# Altium footprint library 2.10-LQFP封装.PcbLib: 97 footprints (part 4 of 7)
Each footprint in its own frame and in the unit in brackets; x right, y up, seen from the top. Pads: shape width x height; smd on the part's side, far side on the other; paste and mask are expansions set on the pad; w line width, h text height; cw(c..) or ccw(c..) is an arc to the next point about the centre after c.
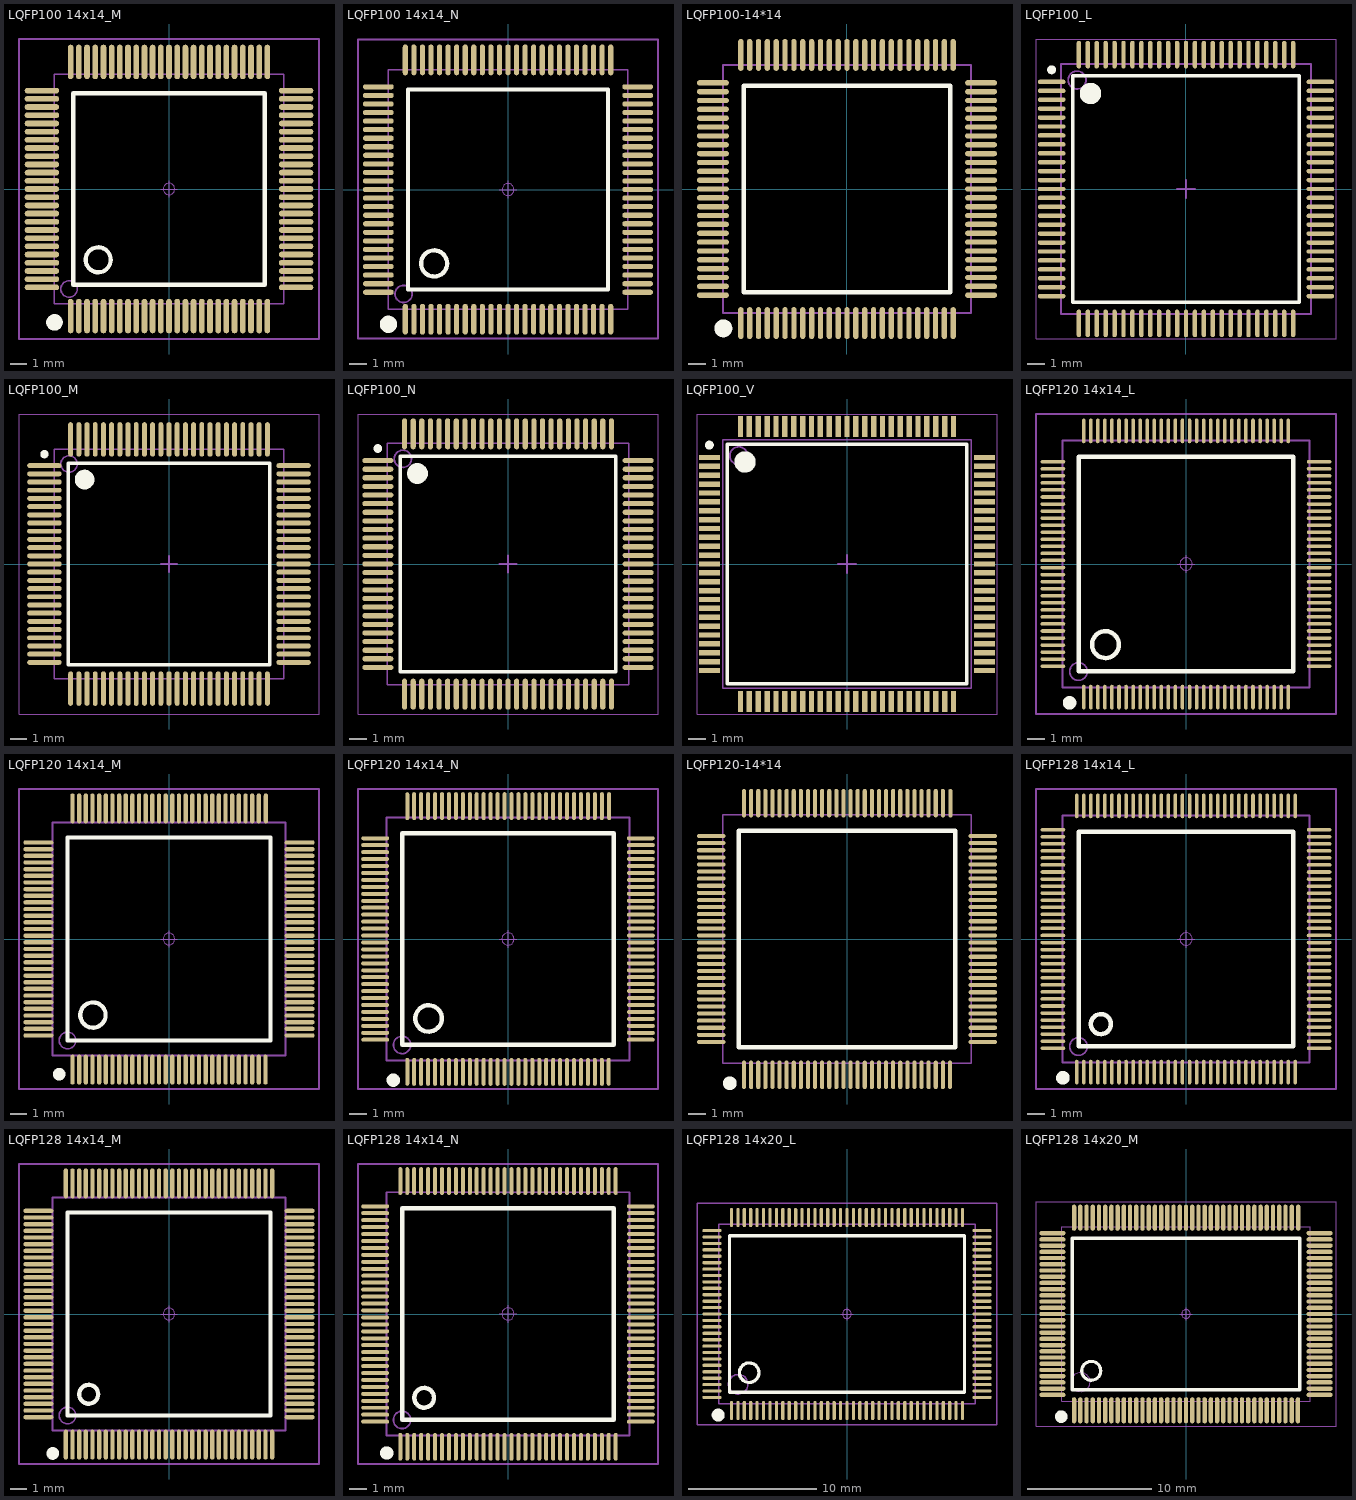
[diagram p3: the footprints below, top view; thin cyan lines are the x and y axes]

## LQFP100 14x14_M [mm] "100脚，体宽14x14mm，脚距0.5mm"
height 1.6
pads (100):
  oval 0.35x2.1 smd: 1(-6,-7.747) 2(-5.5,-7.747) 3(-5,-7.747) 4(-4.5,-7.747) 5(-4,-7.747) 6(-3.5,-7.747) 7(-3,-7.747) 8(-2.5,-7.747) 9(-2,-7.747) 10(-1.5,-7.747) 11(-1,-7.747) 12(-0.5,-7.747) 13(0,-7.747) 14(0.5,-7.747) 15(1,-7.747) 16(1.5,-7.747) 17(2,-7.747) 18(2.5,-7.747) 19(3,-7.747) 20(3.5,-7.747) 21(4,-7.747) 22(4.5,-7.747) 23(5,-7.747) 24(5.5,-7.747) 25(6,-7.747) 51(6,7.758) 52(5.5,7.758) 53(5,7.758) 54(4.5,7.758) 55(4,7.758) 56(3.5,7.758) 57(3,7.758) 58(2.5,7.758) 59(2,7.758) 60(1.5,7.758) 61(1,7.758) 62(0.5,7.758) 63(0,7.758) 64(-0.5,7.758) 65(-1,7.758) 66(-1.5,7.758) 67(-2,7.758) 68(-2.5,7.758) 69(-3,7.758) 70(-3.5,7.758) 71(-4,7.758) 72(-4.5,7.758) 73(-5,7.758) 74(-5.5,7.758) 75(-6,7.758)
  oval 2.1x0.35 smd: 26(7.752,-5.994) 27(7.752,-5.494) 28(7.752,-4.994) 29(7.752,-4.494) 30(7.752,-3.994) 31(7.752,-3.494) 32(7.752,-2.994) 33(7.752,-2.494) 34(7.752,-1.994) 35(7.752,-1.494) 36(7.752,-0.994) 37(7.752,-0.494) 38(7.752,0.006) 39(7.752,0.506) 40(7.752,1.006) 41(7.752,1.506) 42(7.752,2.006) 43(7.752,2.506) 44(7.752,3.006) 45(7.752,3.506) 46(7.752,4.006) 47(7.752,4.506) 48(7.752,5.006) 49(7.752,5.506) 50(7.752,6.006) 76(-7.752,6.006) 77(-7.752,5.506) 78(-7.752,5.006) 79(-7.752,4.506) 80(-7.752,4.006) 81(-7.752,3.506) 82(-7.752,3.006) 83(-7.752,2.506) 84(-7.752,2.006) 85(-7.752,1.506) 86(-7.752,1.006) 87(-7.752,0.506) 88(-7.752,0.006) 89(-7.752,-0.494) 90(-7.752,-0.994) 91(-7.752,-1.494) 92(-7.752,-1.994) 93(-7.752,-2.494) 94(-7.752,-2.994) 95(-7.752,-3.494) 96(-7.752,-3.994) 97(-7.752,-4.494) 98(-7.752,-4.994) 99(-7.752,-5.494) 100(-7.752,-5.994)
Top Overlay:
  circle w0.508: c-6.985,-8.128 r0.25
  circle w0.254: c-4.318,-4.312 r0.762
  lines w0.254: -5.842,-5.836 -5.842,5.848 5.842,5.848 5.842,-5.836 -5.842,-5.836
Mechanical 13:
  circle w0.1: c-6.1,-6.094 r0.5
  lines w0.1: -7,-6.994 7,-6.994 7,7.006 -7,7.006 -7,-6.994
Mechanical 15:
  circle w0.05: c0,0.006 r0.35
  lines w0.05: -0.5,0.006 0.5,0.006 ; 0,-0.494 0,0.506
  lines w0.1: -9.15,-9.144 9.15,-9.144 9.15,9.156 -9.15,9.156 -9.15,-9.144
3D body "LQFP100-14x14.STEP": height 1.45, standoff -0.01, extent -8.003,-7.997 8.003,8.009

## LQFP100 14x14_N [mm] "100脚，体宽14x14mm，脚距0.5mm"
height 1.6
pads (100):
  oval 0.3x1.8 smd: 1(-6,-7.575) 2(-5.5,-7.575) 3(-5,-7.575) 4(-4.5,-7.575) 5(-4,-7.575) 6(-3.5,-7.575) 7(-3,-7.575) 8(-2.5,-7.575) 9(-2,-7.575) 10(-1.5,-7.575) 11(-1,-7.575) 12(-0.5,-7.575) 13(0,-7.575) 14(0.5,-7.575) 15(1,-7.575) 16(1.5,-7.575) 17(2,-7.575) 18(2.5,-7.575) 19(3,-7.575) 20(3.5,-7.575) 21(4,-7.575) 22(4.5,-7.575) 23(5,-7.575) 24(5.5,-7.575) 25(6,-7.575) 51(6,7.575) 52(5.5,7.575) 53(5,7.575) 54(4.5,7.575) 55(4,7.575) 56(3.5,7.575) 57(3,7.575) 58(2.5,7.575) 59(2,7.575) 60(1.5,7.575) 61(1,7.575) 62(0.5,7.575) 63(0,7.575) 64(-0.5,7.575) 65(-1,7.575) 66(-1.5,7.575) 67(-2,7.575) 68(-2.5,7.575) 69(-3,7.575) 70(-3.5,7.575) 71(-4,7.575) 72(-4.5,7.575) 73(-5,7.575) 74(-5.5,7.575) 75(-6,7.575)
  oval 1.8x0.3 smd: 26(7.576,-6) 27(7.576,-5.5) 28(7.576,-5) 29(7.576,-4.5) 30(7.576,-4) 31(7.576,-3.5) 32(7.576,-3) 33(7.576,-2.5) 34(7.576,-2) 35(7.576,-1.5) 36(7.576,-1) 37(7.576,-0.5) 38(7.576,0) 39(7.576,0.5) 40(7.576,1) 41(7.576,1.5) 42(7.576,2) 43(7.576,2.5) 44(7.576,3) 45(7.576,3.5) 46(7.576,4) 47(7.576,4.5) 48(7.576,5) 49(7.576,5.5) 50(7.576,6) 76(-7.575,6) 77(-7.575,5.5) 78(-7.575,5) 79(-7.575,4.5) 80(-7.575,4) 81(-7.575,3.5) 82(-7.575,3) 83(-7.575,2.5) 84(-7.575,2) 85(-7.575,1.5) 86(-7.575,1) 87(-7.575,0.5) 88(-7.575,0) 89(-7.575,-0.5) 90(-7.575,-1) 91(-7.575,-1.5) 92(-7.575,-2) 93(-7.575,-2.5) 94(-7.575,-3) 95(-7.575,-3.5) 96(-7.575,-4) 97(-7.575,-4.5) 98(-7.575,-5) 99(-7.575,-5.5) 100(-7.575,-6)
Top Overlay:
  circle w0.508: c-6.985,-7.874 r0.25
  circle w0.254: c-4.318,-4.318 r0.762
  lines w0.254: -5.842,-5.842 -5.842,5.842 5.842,5.842 5.842,-5.842 -5.842,-5.842
Mechanical 13:
  circle w0.1: c-6.1,-6.1 r0.5
  lines w0.1: -7,-7 7,-7 7,7 -7,7 -7,-7
Mechanical 15:
  circle w0.05: c0,0 r0.35
  lines w0.05: -0.5,0 0.5,0 ; 0,-0.5 0,0.5
  lines w0.1: -8.763,-8.7 8.763,-8.7 8.763,8.763 -8.763,8.763 -8.763,-8.7
3D body "LQFP100-14x14.STEP": height 1.45, standoff -0.01, extent -8.003,-8.003 8.003,8.003

## LQFP100-14*14 [mm] "14x14mm，0.5mm       淘宝ID:黄晶宝石"
height 1.6
pads (100):
  oval 0.3x1.8 smd: 1(-6,-7.575) 2(-5.5,-7.575) 3(-5,-7.575) 4(-4.5,-7.575) 5(-4,-7.575) 6(-3.5,-7.575) 7(-3,-7.575) 8(-2.5,-7.575) 9(-2,-7.575) 10(-1.5,-7.575) 11(-1,-7.575) 12(-0.5,-7.575) 13(0,-7.575) 14(0.5,-7.575) 15(1,-7.575) 16(1.5,-7.575) 17(2,-7.575) 18(2.5,-7.575) 19(3,-7.575) 20(3.5,-7.575) 21(4,-7.575) 22(4.5,-7.575) 23(5,-7.575) 24(5.5,-7.575) 25(6,-7.575) 51(6,7.575) 52(5.5,7.575) 53(5,7.575) 54(4.5,7.575) 55(4,7.575) 56(3.5,7.575) 57(3,7.575) 58(2.5,7.575) 59(2,7.575) 60(1.5,7.575) 61(1,7.575) 62(0.5,7.575) 63(0,7.575) 64(-0.5,7.575) 65(-1,7.575) 66(-1.5,7.575) 67(-2,7.575) 68(-2.5,7.575) 69(-3,7.575) 70(-3.5,7.575) 71(-4,7.575) 72(-4.5,7.575) 73(-5,7.575) 74(-5.5,7.575) 75(-6,7.575)
  oval 1.8x0.3 smd: 26(7.576,-6) 27(7.576,-5.5) 28(7.576,-5) 29(7.576,-4.5) 30(7.576,-4) 31(7.576,-3.5) 32(7.576,-3) 33(7.576,-2.5) 34(7.576,-2) 35(7.576,-1.5) 36(7.576,-1) 37(7.576,-0.5) 38(7.576,0) 39(7.576,0.5) 40(7.576,1) 41(7.576,1.5) 42(7.576,2) 43(7.576,2.5) 44(7.576,3) 45(7.576,3.5) 46(7.576,4) 47(7.576,4.5) 48(7.576,5) 49(7.576,5.5) 50(7.576,6) 76(-7.575,6) 77(-7.575,5.5) 78(-7.575,5) 79(-7.575,4.5) 80(-7.575,4) 81(-7.575,3.5) 82(-7.575,3) 83(-7.575,2.5) 84(-7.575,2) 85(-7.575,1.5) 86(-7.575,1) 87(-7.575,0.5) 88(-7.575,0) 89(-7.575,-0.5) 90(-7.575,-1) 91(-7.575,-1.5) 92(-7.575,-2) 93(-7.575,-2.5) 94(-7.575,-3) 95(-7.575,-3.5) 96(-7.575,-4) 97(-7.575,-4.5) 98(-7.575,-5) 99(-7.575,-5.5) 100(-7.575,-6)
Top Overlay:
  circle w0.508: c-6.985,-7.874 r0.25
  lines w0.254: -5.842,-5.842 5.842,-5.842 5.842,5.842 -5.842,5.842 -5.842,-5.842
Mechanical 13:
  lines w0.1: -7,-7 -7,7 7,7 7,-7 -7,-7
3D body "LQFP100-14x14.STEP": height 1.45, standoff 0, extent -8.003,-8.003 8.003,8.003

## LQFP100_L [mm] "封装库来自淘宝 ID：黄晶宝石 Thin QFP, 100-Leads, Body 14x14mm, Pitch 0.5mm, IPC High Density"
height 1.6
pads (100):
  oval 1.55x0.25 smd: 1(-7.525,6) 2(-7.525,5.5) 3(-7.525,5) 4(-7.525,4.5) 5(-7.525,4) 6(-7.525,3.5) 7(-7.525,3) 8(-7.525,2.5) 9(-7.525,2) 10(-7.525,1.5) 11(-7.525,1) 12(-7.525,0.5) 13(-7.525,0) 14(-7.525,-0.5) 15(-7.525,-1) 16(-7.525,-1.5) 17(-7.525,-2) 18(-7.525,-2.5) 19(-7.525,-3) 20(-7.525,-3.5) 21(-7.525,-4) 22(-7.525,-4.5) 23(-7.525,-5) 24(-7.525,-5.5) 25(-7.525,-6) 51(7.525,-6) 52(7.525,-5.5) 53(7.525,-5) 54(7.525,-4.5) 55(7.525,-4) 56(7.525,-3.5) 57(7.525,-3) 58(7.525,-2.5) 59(7.525,-2) 60(7.525,-1.5) 61(7.525,-1) 62(7.525,-0.5) 63(7.525,0) 64(7.525,0.5) 65(7.525,1) 66(7.525,1.5) 67(7.525,2) 68(7.525,2.5) 69(7.525,3) 70(7.525,3.5) 71(7.525,4) 72(7.525,4.5) 73(7.525,5) 74(7.525,5.5) 75(7.525,6)
  oval 0.25x1.55 smd: 26(-6,-7.525) 27(-5.5,-7.525) 28(-5,-7.525) 29(-4.5,-7.525) 30(-4,-7.525) 31(-3.5,-7.525) 32(-3,-7.525) 33(-2.5,-7.525) 34(-2,-7.525) 35(-1.5,-7.525) 36(-1,-7.525) 37(-0.5,-7.525) 38(0,-7.525) 39(0.5,-7.525) 40(1,-7.525) 41(1.5,-7.525) 42(2,-7.525) 43(2.5,-7.525) 44(3,-7.525) 45(3.5,-7.525) 46(4,-7.525) 47(4.5,-7.525) 48(5,-7.525) 49(5.5,-7.525) 50(6,-7.525) 76(6,7.525) 77(5.5,7.525) 78(5,7.525) 79(4.5,7.525) 80(4,7.525) 81(3.5,7.525) 82(3,7.525) 83(2.5,7.525) 84(2,7.525) 85(1.5,7.525) 86(1,7.525) 87(0.5,7.525) 88(0,7.525) 89(-0.5,7.525) 90(-1,7.525) 91(-1.5,7.525) 92(-2,7.525) 93(-2.5,7.525) 94(-3,7.525) 95(-3.5,7.525) 96(-4,7.525) 97(-4.5,7.525) 98(-5,7.525) 99(-5.5,7.525) 100(-6,7.525)
Top Overlay:
  circle w0.6: c-5.35,5.35 r0.3
  circle w0.25: c-7.525,6.675 r0.125
  lines w0.2: -6.35,-6.35 6.35,-6.35 6.35,6.35 -6.35,6.35 -6.35,-6.35
Mechanical 13:
  circle w0.1: c-6.1,6.1 r0.5
  lines w0.1: -7,-7 7,-7 7,7 -7,7 -7,-7
Mechanical 15:
  lines w0.05: -8.4,-8.4 8.4,-8.4 8.4,8.4 -8.4,8.4 -8.4,-8.4
  lines w0.1: -0.5,0 0.5,0 ; 0,-0.5 0,0.5
3D body "LQFP100-14x14.STEP": height 1.45, standoff -0.01, extent -8.003,-8.003 8.003,8.003

## LQFP100_M [mm] "封装库来自淘宝 ID：黄晶宝石 Thin QFP, 100-Leads, Body 14x14mm, Pitch 0.5mm, IPC Low Density"
height 1.6
pads (100):
  oval 2.1x0.3 smd: 1(-7.6,6) 2(-7.6,5.5) 3(-7.6,5) 4(-7.6,4.5) 5(-7.6,4) 6(-7.6,3.5) 7(-7.6,3) 8(-7.6,2.5) 9(-7.6,2) 10(-7.6,1.5) 11(-7.6,1) 12(-7.6,0.5) 13(-7.6,0) 14(-7.6,-0.5) 15(-7.6,-1) 16(-7.6,-1.5) 17(-7.6,-2) 18(-7.6,-2.5) 19(-7.6,-3) 20(-7.6,-3.5) 21(-7.6,-4) 22(-7.6,-4.5) 23(-7.6,-5) 24(-7.6,-5.5) 25(-7.6,-6) 51(7.6,-6) 52(7.6,-5.5) 53(7.6,-5) 54(7.6,-4.5) 55(7.6,-4) 56(7.6,-3.5) 57(7.6,-3) 58(7.6,-2.5) 59(7.6,-2) 60(7.6,-1.5) 61(7.6,-1) 62(7.6,-0.5) 63(7.6,0) 64(7.6,0.5) 65(7.6,1) 66(7.6,1.5) 67(7.6,2) 68(7.6,2.5) 69(7.6,3) 70(7.6,3.5) 71(7.6,4) 72(7.6,4.5) 73(7.6,5) 74(7.6,5.5) 75(7.6,6)
  oval 0.3x2.1 smd: 26(-6,-7.6) 27(-5.5,-7.6) 28(-5,-7.6) 29(-4.5,-7.6) 30(-4,-7.6) 31(-3.5,-7.6) 32(-3,-7.6) 33(-2.5,-7.6) 34(-2,-7.6) 35(-1.5,-7.6) 36(-1,-7.6) 37(-0.5,-7.6) 38(0,-7.6) 39(0.5,-7.6) 40(1,-7.6) 41(1.5,-7.6) 42(2,-7.6) 43(2.5,-7.6) 44(3,-7.6) 45(3.5,-7.6) 46(4,-7.6) 47(4.5,-7.6) 48(5,-7.6) 49(5.5,-7.6) 50(6,-7.6) 76(6,7.6) 77(5.5,7.6) 78(5,7.6) 79(4.5,7.6) 80(4,7.6) 81(3.5,7.6) 82(3,7.6) 83(2.5,7.6) 84(2,7.6) 85(1.5,7.6) 86(1,7.6) 87(0.5,7.6) 88(0,7.6) 89(-0.5,7.6) 90(-1,7.6) 91(-1.5,7.6) 92(-2,7.6) 93(-2.5,7.6) 94(-3,7.6) 95(-3.5,7.6) 96(-4,7.6) 97(-4.5,7.6) 98(-5,7.6) 99(-5.5,7.6) 100(-6,7.6)
Top Overlay:
  circle w0.25: c-7.6,6.7 r0.125
  circle w0.6: c-5.15,5.15 r0.3
  lines w0.2: -6.15,-6.15 -6.15,6.15 6.15,6.15 6.15,-6.15 -6.15,-6.15
Mechanical 13:
  circle w0.1: c-6.1,6.1 r0.5
  lines w0.1: -7,-7 -7,7 7,7 7,-7 -7,-7
Mechanical 15:
  lines w0.05: -9.15,-9.15 -9.15,9.15 9.15,9.15 9.15,-9.15 -9.15,-9.15
  lines w0.1: -0.5,0 0.5,0 ; 0,-0.5 0,0.5
3D body "LQFP100-14x14.STEP": height 1.45, standoff -0.01, extent -8.003,-8.003 8.003,8.003

## LQFP100_N [mm] "封装库来自淘宝 ID：黄晶宝石 Thin QFP, 100-Leads, Body 14x14mm, Pitch 0.5mm, IPC Medium Density"
height 1.6
pads (100):
  oval 1.8x0.3 smd: 1(-7.55,6) 2(-7.55,5.5) 3(-7.55,5) 4(-7.55,4.5) 5(-7.55,4) 6(-7.55,3.5) 7(-7.55,3) 8(-7.55,2.5) 9(-7.55,2) 10(-7.55,1.5) 11(-7.55,1) 12(-7.55,0.5) 13(-7.55,0) 14(-7.55,-0.5) 15(-7.55,-1) 16(-7.55,-1.5) 17(-7.55,-2) 18(-7.55,-2.5) 19(-7.55,-3) 20(-7.55,-3.5) 21(-7.55,-4) 22(-7.55,-4.5) 23(-7.55,-5) 24(-7.55,-5.5) 25(-7.55,-6) 51(7.55,-6) 52(7.55,-5.5) 53(7.55,-5) 54(7.55,-4.5) 55(7.55,-4) 56(7.55,-3.5) 57(7.55,-3) 58(7.55,-2.5) 59(7.55,-2) 60(7.55,-1.5) 61(7.55,-1) 62(7.55,-0.5) 63(7.55,0) 64(7.55,0.5) 65(7.55,1) 66(7.55,1.5) 67(7.55,2) 68(7.55,2.5) 69(7.55,3) 70(7.55,3.5) 71(7.55,4) 72(7.55,4.5) 73(7.55,5) 74(7.55,5.5) 75(7.55,6)
  oval 0.3x1.8 smd: 26(-6,-7.55) 27(-5.5,-7.55) 28(-5,-7.55) 29(-4.5,-7.55) 30(-4,-7.55) 31(-3.5,-7.55) 32(-3,-7.55) 33(-2.5,-7.55) 34(-2,-7.55) 35(-1.5,-7.55) 36(-1,-7.55) 37(-0.5,-7.55) 38(0,-7.55) 39(0.5,-7.55) 40(1,-7.55) 41(1.5,-7.55) 42(2,-7.55) 43(2.5,-7.55) 44(3,-7.55) 45(3.5,-7.55) 46(4,-7.55) 47(4.5,-7.55) 48(5,-7.55) 49(5.5,-7.55) 50(6,-7.55) 76(6,7.55) 77(5.5,7.55) 78(5,7.55) 79(4.5,7.55) 80(4,7.55) 81(3.5,7.55) 82(3,7.55) 83(2.5,7.55) 84(2,7.55) 85(1.5,7.55) 86(1,7.55) 87(0.5,7.55) 88(0,7.55) 89(-0.5,7.55) 90(-1,7.55) 91(-1.5,7.55) 92(-2,7.55) 93(-2.5,7.55) 94(-3,7.55) 95(-3.5,7.55) 96(-4,7.55) 97(-4.5,7.55) 98(-5,7.55) 99(-5.5,7.55) 100(-6,7.55)
Top Overlay:
  circle w0.25: c-7.55,6.7 r0.125
  circle w0.6: c-5.25,5.25 r0.3
  lines w0.2: -6.25,-6.25 -6.25,6.25 6.25,6.25 6.25,-6.25 -6.25,-6.25
Mechanical 13:
  circle w0.1: c-6.1,6.1 r0.5
  lines w0.1: -7,-7 -7,7 7,7 7,-7 -7,-7
Mechanical 15:
  lines w0.05: -8.7,-8.7 -8.7,8.7 8.7,8.7 8.7,-8.7 -8.7,-8.7
  lines w0.1: -0.5,0 0.5,0 ; 0,-0.5 0,0.5
3D body "LQFP100-14x14.STEP": height 1.45, standoff -0.01, extent -8.003,-8.003 8.003,8.003

## LQFP100_V [mm] "Thin QFP, 100-Leads, Body 14x14mm, Pitch 0.5mm, ST Recommended"
height 1.6
pads (100):
  rect 1.2x0.3 smd: 1(-7.75,6) 2(-7.75,5.5) 3(-7.75,5) 4(-7.75,4.5) 5(-7.75,4) 6(-7.75,3.5) 7(-7.75,3) 8(-7.75,2.5) 9(-7.75,2) 10(-7.75,1.5) 11(-7.75,1) 12(-7.75,0.5) 13(-7.75,0) 14(-7.75,-0.5) 15(-7.75,-1) 16(-7.75,-1.5) 17(-7.75,-2) 18(-7.75,-2.5) 19(-7.75,-3) 20(-7.75,-3.5) 21(-7.75,-4) 22(-7.75,-4.5) 23(-7.75,-5) 24(-7.75,-5.5) 25(-7.75,-6) 51(7.75,-6) 52(7.75,-5.5) 53(7.75,-5) 54(7.75,-4.5) 55(7.75,-4) 56(7.75,-3.5) 57(7.75,-3) 58(7.75,-2.5) 59(7.75,-2) 60(7.75,-1.5) 61(7.75,-1) 62(7.75,-0.5) 63(7.75,0) 64(7.75,0.5) 65(7.75,1) 66(7.75,1.5) 67(7.75,2) 68(7.75,2.5) 69(7.75,3) 70(7.75,3.5) 71(7.75,4) 72(7.75,4.5) 73(7.75,5) 74(7.75,5.5) 75(7.75,6)
  rect 0.3x1.2 smd: 26(-6,-7.75) 27(-5.5,-7.75) 28(-5,-7.75) 29(-4.5,-7.75) 30(-4,-7.75) 31(-3.5,-7.75) 32(-3,-7.75) 33(-2.5,-7.75) 34(-2,-7.75) 35(-1.5,-7.75) 36(-1,-7.75) 37(-0.5,-7.75) 38(0,-7.75) 39(0.5,-7.75) 40(1,-7.75) 41(1.5,-7.75) 42(2,-7.75) 43(2.5,-7.75) 44(3,-7.75) 45(3.5,-7.75) 46(4,-7.75) 47(4.5,-7.75) 48(5,-7.75) 49(5.5,-7.75) 50(6,-7.75) 76(6,7.75) 77(5.5,7.75) 78(5,7.75) 79(4.5,7.75) 80(4,7.75) 81(3.5,7.75) 82(3,7.75) 83(2.5,7.75) 84(2,7.75) 85(1.5,7.75) 86(1,7.75) 87(0.5,7.75) 88(0,7.75) 89(-0.5,7.75) 90(-1,7.75) 91(-1.5,7.75) 92(-2,7.75) 93(-2.5,7.75) 94(-3,7.75) 95(-3.5,7.75) 96(-4,7.75) 97(-4.5,7.75) 98(-5,7.75) 99(-5.5,7.75) 100(-6,7.75)
Top Overlay:
  circle w0.6: c-5.75,5.75 r0.3
  circle w0.25: c-7.75,6.7 r0.125
  lines w0.2: -6.75,-6.75 6.75,-6.75 6.75,6.75 -6.75,6.75 -6.75,-6.75
Mechanical 13:
  circle w0.1: c-6.1,6.1 r0.5
  lines w0.1: -7,-7 7,-7 7,7 -7,7 -7,-7
Mechanical 15:
  lines w0.05: -8.45,-8.45 8.45,-8.45 8.45,8.45 -8.45,8.45 -8.45,-8.45
  lines w0.1: -0.5,0 0.5,0 ; 0,-0.5 0,0.5
3D body: height 1.6, standoff 0.05, extent -7,-7 7,7

## LQFP120 14x14_L [mm] "120脚，体宽：14x14mm, 脚距：0.4mm"
pads (120):
  oval 0.2x1.4 smd: 1(-5.8,-7.549) 2(-5.4,-7.549) 3(-5,-7.549) 4(-4.6,-7.549) 5(-4.2,-7.549) 6(-3.8,-7.549) 7(-3.4,-7.549) 8(-3,-7.549) 9(-2.6,-7.549) 10(-2.2,-7.549) 11(-1.8,-7.549) 12(-1.4,-7.549) 13(-1,-7.549) 14(-0.6,-7.549) 15(-0.2,-7.549) 16(0.2,-7.549) 17(0.6,-7.549) 18(1,-7.549) 19(1.4,-7.549) 20(1.8,-7.549) 21(2.2,-7.549) 22(2.6,-7.549) 23(3,-7.549) 24(3.4,-7.549) 25(3.8,-7.549) 26(4.2,-7.549) 27(4.6,-7.549) 28(5,-7.549) 29(5.4,-7.549) 30(5.8,-7.549) 61(5.8,7.549) 62(5.4,7.549) 63(5,7.549) 64(4.6,7.549) 65(4.2,7.549) 66(3.8,7.549) 67(3.4,7.549) 68(3,7.549) 69(2.6,7.549) 70(2.2,7.549) 71(1.8,7.549) 72(1.4,7.549) 73(1,7.549) 74(0.6,7.549) 75(0.2,7.549) 76(-0.2,7.549) 77(-0.6,7.549) 78(-1,7.549) 79(-1.4,7.549) 80(-1.8,7.549) 81(-2.2,7.549) 82(-2.6,7.549) 83(-3,7.549) 84(-3.4,7.549) 85(-3.8,7.549) 86(-4.2,7.549) 87(-4.6,7.549) 88(-5,7.549) 89(-5.4,7.549) 90(-5.8,7.549)
  oval 1.4x0.2 smd: 31(7.549,-5.8) 32(7.549,-5.4) 33(7.549,-5) 34(7.549,-4.6) 35(7.549,-4.2) 36(7.549,-3.8) 37(7.549,-3.4) 38(7.549,-3) 39(7.549,-2.6) 40(7.549,-2.2) 41(7.549,-1.8) 42(7.549,-1.4) 43(7.549,-1) 44(7.549,-0.6) 45(7.549,-0.2) 46(7.549,0.2) 47(7.549,0.6) 48(7.549,1) 49(7.549,1.4) 50(7.549,1.8) 51(7.549,2.2) 52(7.549,2.6) 53(7.549,3) 54(7.549,3.4) 55(7.549,3.8) 56(7.549,4.2) 57(7.549,4.6) 58(7.549,5) 59(7.549,5.4) 60(7.549,5.8) 91(-7.549,5.8) 92(-7.549,5.4) 93(-7.549,5) 94(-7.549,4.6) 95(-7.549,4.2) 96(-7.549,3.8) 97(-7.549,3.4) 98(-7.549,3) 99(-7.549,2.6) 100(-7.549,2.2) 101(-7.549,1.8) 102(-7.549,1.4) 103(-7.549,1) 104(-7.549,0.6) 105(-7.549,0.2) 106(-7.549,-0.2) 107(-7.549,-0.6) 108(-7.549,-1) 109(-7.549,-1.4) 110(-7.549,-1.8) 111(-7.549,-2.2) 112(-7.549,-2.6) 113(-7.549,-3) 114(-7.549,-3.4) 115(-7.549,-3.8) 116(-7.549,-4.2) 117(-7.549,-4.6) 118(-7.549,-5) 119(-7.549,-5.4) 120(-7.549,-5.8)
Top Overlay:
  circle w0.254: c-4.572,-4.572 r0.762
  circle w0.508: c-6.604,-7.874 r0.127
  lines w0.254: -6.096,-6.096 -6.096,6.096 6.096,6.096 6.096,-6.096 -6.096,-6.096
Mechanical 13:
  circle w0.1: c-6.1,-6.1 r0.5
  lines w0.1: -7,-7 -7,7 7,7 7,-7 -7,-7
Mechanical 15:
  circle w0.05: c0,0 r0.35
  lines w0.05: -0.5,0 0.5,0 ; 0,-0.5 0,0.5
  lines w0.1: -8.509,-8.509 -8.509,8.509 8.509,8.509 8.509,-8.509 -8.509,-8.509
3D body "LQFP120-14x14.STEP": height 1.45, standoff -0.01, extent -8.003,-8.003 8.003,8.003

## LQFP120 14x14_M [mm] "120脚，体宽：14x14mm, 脚距：0.4mm       淘宝ID:黄晶宝石"
pads (120):
  oval 0.26x1.8 smd: 1(-5.8,-7.854) 2(-5.4,-7.854) 3(-5,-7.854) 4(-4.6,-7.854) 5(-4.2,-7.854) 6(-3.8,-7.854) 7(-3.4,-7.854) 8(-3,-7.854) 9(-2.6,-7.854) 10(-2.2,-7.854) 11(-1.8,-7.854) 12(-1.4,-7.854) 13(-1,-7.854) 14(-0.6,-7.854) 15(-0.2,-7.854) 16(0.2,-7.854) 17(0.6,-7.854) 18(1,-7.854) 19(1.4,-7.854) 20(1.8,-7.854) 21(2.2,-7.854) 22(2.6,-7.854) 23(3,-7.854) 24(3.4,-7.854) 25(3.8,-7.854) 26(4.2,-7.854) 27(4.6,-7.854) 28(5,-7.854) 29(5.4,-7.854) 30(5.8,-7.854) 61(5.825,7.854) 62(5.4,7.854) 63(5,7.854) 64(4.6,7.854) 65(4.2,7.854) 66(3.8,7.854) 67(3.4,7.854) 68(3,7.854) 69(2.6,7.854) 70(2.2,7.854) 71(1.8,7.854) 72(1.4,7.854) 73(1,7.854) 74(0.6,7.854) 75(0.2,7.854) 76(-0.2,7.854) 77(-0.6,7.854) 78(-1,7.854) 79(-1.4,7.854) 80(-1.8,7.854) 81(-2.2,7.854) 82(-2.6,7.854) 83(-3,7.854) 84(-3.4,7.854) 85(-3.8,7.854) 86(-4.2,7.854) 87(-4.6,7.854) 88(-5,7.854) 89(-5.4,7.854) 90(-5.8,7.854)
  oval 1.8x0.26 smd: 31(7.854,-5.8) 32(7.854,-5.4) 33(7.854,-5) 34(7.854,-4.6) 35(7.854,-4.2) 36(7.854,-3.8) 37(7.854,-3.4) 38(7.854,-3) 39(7.854,-2.6) 40(7.854,-2.2) 41(7.854,-1.8) 42(7.854,-1.4) 43(7.854,-1) 44(7.854,-0.6) 45(7.854,-0.2) 46(7.854,0.2) 47(7.854,0.6) 48(7.854,1) 49(7.854,1.4) 50(7.854,1.8) 51(7.854,2.2) 52(7.854,2.6) 53(7.854,3) 54(7.854,3.4) 55(7.854,3.8) 56(7.854,4.2) 57(7.854,4.6) 58(7.854,5) 59(7.854,5.4) 60(7.854,5.8) 91(-7.854,5.8) 92(-7.854,5.4) 93(-7.854,5) 94(-7.854,4.6) 95(-7.854,4.2) 96(-7.854,3.8) 97(-7.854,3.4) 98(-7.854,3) 99(-7.854,2.6) 100(-7.854,2.2) 101(-7.854,1.8) 102(-7.854,1.4) 103(-7.854,1) 104(-7.854,0.6) 105(-7.854,0.2) 106(-7.854,-0.2) 107(-7.854,-0.6) 108(-7.854,-1) 109(-7.854,-1.4) 110(-7.854,-1.8) 111(-7.854,-2.2) 112(-7.854,-2.6) 113(-7.854,-3) 114(-7.854,-3.4) 115(-7.854,-3.8) 116(-7.854,-4.2) 117(-7.854,-4.6) 118(-7.854,-5) 119(-7.854,-5.4) 120(-7.854,-5.8)
Top Overlay:
  circle w0.508: c-6.604,-8.128 r0.127
  circle w0.254: c-4.572,-4.572 r0.762
  lines w0.254: -6.096,-6.096 6.096,-6.096 6.096,6.096 -6.096,6.096 -6.096,-6.096
Mechanical 13:
  circle w0.1: c-6.1,-6.1 r0.5
  lines w0.1: -7,-7 7,-7 7,7 -7,7 -7,-7
Mechanical 15:
  circle w0.05: c0,0 r0.35
  lines w0.05: -0.5,0 0.5,0 ; 0,-0.5 0,0.5
  lines w0.1: -9.017,-9.017 9.017,-9.017 9.017,9.017 -9.017,9.017 -9.017,-9.017
3D body "LQFP120-14x14.STEP": height 1.45, standoff -0.01, extent -8.003,-8.003 8.003,8.003

## LQFP120 14x14_N [mm] "120脚，体宽：14x14mm, 脚距：0.4mm"
pads (120):
  oval 0.23x1.6 smd: 1(-5.8,-7.651) 2(-5.4,-7.651) 3(-5,-7.651) 4(-4.6,-7.651) 5(-4.2,-7.651) 6(-3.8,-7.651) 7(-3.4,-7.651) 8(-3,-7.651) 9(-2.6,-7.651) 10(-2.2,-7.651) 11(-1.8,-7.651) 12(-1.4,-7.651) 13(-1,-7.651) 14(-0.6,-7.651) 15(-0.2,-7.651) 16(0.2,-7.651) 17(0.6,-7.651) 18(1,-7.651) 19(1.4,-7.651) 20(1.8,-7.651) 21(2.2,-7.651) 22(2.6,-7.651) 23(3,-7.651) 24(3.4,-7.651) 25(3.8,-7.651) 26(4.2,-7.651) 27(4.6,-7.651) 28(5,-7.651) 29(5.4,-7.651) 30(5.8,-7.651) 61(5.825,7.651) 62(5.4,7.651) 63(5,7.651) 64(4.6,7.651) 65(4.2,7.651) 66(3.8,7.651) 67(3.4,7.651) 68(3,7.651) 69(2.6,7.651) 70(2.2,7.651) 71(1.8,7.651) 72(1.4,7.651) 73(1,7.651) 74(0.6,7.651) 75(0.2,7.651) 76(-0.2,7.651) 77(-0.6,7.651) 78(-1,7.651) 79(-1.4,7.651) 80(-1.8,7.651) 81(-2.2,7.651) 82(-2.6,7.651) 83(-3,7.651) 84(-3.4,7.651) 85(-3.8,7.651) 86(-4.2,7.651) 87(-4.6,7.651) 88(-5,7.651) 89(-5.4,7.651) 90(-5.8,7.651)
  oval 1.6x0.23 smd: 31(7.651,-5.8) 32(7.651,-5.4) 33(7.651,-5) 34(7.651,-4.6) 35(7.651,-4.2) 36(7.651,-3.8) 37(7.651,-3.4) 38(7.651,-3) 39(7.651,-2.6) 40(7.651,-2.2) 41(7.651,-1.8) 42(7.651,-1.4) 43(7.651,-1) 44(7.651,-0.6) 45(7.651,-0.2) 46(7.651,0.2) 47(7.651,0.6) 48(7.651,1) 49(7.651,1.4) 50(7.651,1.8) 51(7.651,2.2) 52(7.651,2.6) 53(7.651,3) 54(7.651,3.4) 55(7.651,3.8) 56(7.651,4.2) 57(7.651,4.6) 58(7.651,5) 59(7.651,5.4) 60(7.651,5.8) 91(-7.651,5.8) 92(-7.651,5.4) 93(-7.651,5) 94(-7.651,4.6) 95(-7.651,4.2) 96(-7.651,3.8) 97(-7.651,3.4) 98(-7.651,3) 99(-7.651,2.6) 100(-7.651,2.2) 101(-7.651,1.8) 102(-7.651,1.4) 103(-7.651,1) 104(-7.651,0.6) 105(-7.651,0.2) 106(-7.651,-0.2) 107(-7.651,-0.6) 108(-7.651,-1) 109(-7.651,-1.4) 110(-7.651,-1.8) 111(-7.651,-2.2) 112(-7.651,-2.6) 113(-7.651,-3) 114(-7.651,-3.4) 115(-7.651,-3.8) 116(-7.651,-4.2) 117(-7.651,-4.6) 118(-7.651,-5) 119(-7.651,-5.4) 120(-7.651,-5.8)
Top Overlay:
  circle w0.254: c-4.572,-4.572 r0.762
  circle w0.508: c-6.604,-8.128 r0.127
  lines w0.254: -6.096,-6.096 -6.096,6.096 6.096,6.096 6.096,-6.096 -6.096,-6.096
Mechanical 13:
  circle w0.1: c-6.1,-6.1 r0.5
  lines w0.1: -7,-7 -7,7 7,7 7,-7 -7,-7
Mechanical 15:
  circle w0.05: c0,0 r0.35
  lines w0.05: -0.5,0 0.5,0 ; 0,-0.5 0,0.5
  lines w0.1: -8.636,-8.636 -8.636,8.636 8.636,8.636 8.636,-8.636 -8.636,-8.636
3D body "LQFP120-14x14.STEP": height 1.45, standoff -0.01, extent -8.003,-8.003 8.003,8.003

## LQFP120-14*14 [mm] "4x14mm, 0.4mm       淘宝ID:黄晶宝石"
pads (120):
  oval 0.23x1.6 smd: 1(-5.8,-7.651) 2(-5.4,-7.651) 3(-5,-7.651) 4(-4.6,-7.651) 5(-4.2,-7.651) 6(-3.8,-7.651) 7(-3.4,-7.651) 8(-3,-7.651) 9(-2.6,-7.651) 10(-2.2,-7.651) 11(-1.8,-7.651) 12(-1.4,-7.651) 13(-1,-7.651) 14(-0.6,-7.651) 15(-0.2,-7.651) 16(0.2,-7.651) 17(0.6,-7.651) 18(1,-7.651) 19(1.4,-7.651) 20(1.8,-7.651) 21(2.2,-7.651) 22(2.6,-7.651) 23(3,-7.651) 24(3.4,-7.651) 25(3.8,-7.651) 26(4.2,-7.651) 27(4.6,-7.651) 28(5,-7.651) 29(5.4,-7.651) 30(5.8,-7.651) 61(5.825,7.651) 62(5.4,7.651) 63(5,7.651) 64(4.6,7.651) 65(4.2,7.651) 66(3.8,7.651) 67(3.4,7.651) 68(3,7.651) 69(2.6,7.651) 70(2.2,7.651) 71(1.8,7.651) 72(1.4,7.651) 73(1,7.651) 74(0.6,7.651) 75(0.2,7.651) 76(-0.2,7.651) 77(-0.6,7.651) 78(-1,7.651) 79(-1.4,7.651) 80(-1.8,7.651) 81(-2.2,7.651) 82(-2.6,7.651) 83(-3,7.651) 84(-3.4,7.651) 85(-3.8,7.651) 86(-4.2,7.651) 87(-4.6,7.651) 88(-5,7.651) 89(-5.4,7.651) 90(-5.8,7.651)
  oval 1.6x0.23 smd: 31(7.651,-5.8) 32(7.651,-5.4) 33(7.651,-5) 34(7.651,-4.6) 35(7.651,-4.2) 36(7.651,-3.8) 37(7.651,-3.4) 38(7.651,-3) 39(7.651,-2.6) 40(7.651,-2.2) 41(7.651,-1.8) 42(7.651,-1.4) 43(7.651,-1) 44(7.651,-0.6) 45(7.651,-0.2) 46(7.651,0.2) 47(7.651,0.6) 48(7.651,1) 49(7.651,1.4) 50(7.651,1.8) 51(7.651,2.2) 52(7.651,2.6) 53(7.651,3) 54(7.651,3.4) 55(7.651,3.8) 56(7.651,4.2) 57(7.651,4.6) 58(7.651,5) 59(7.651,5.4) 60(7.651,5.8) 91(-7.651,5.8) 92(-7.651,5.4) 93(-7.651,5) 94(-7.651,4.6) 95(-7.651,4.2) 96(-7.651,3.8) 97(-7.651,3.4) 98(-7.651,3) 99(-7.651,2.6) 100(-7.651,2.2) 101(-7.651,1.8) 102(-7.651,1.4) 103(-7.651,1) 104(-7.651,0.6) 105(-7.651,0.2) 106(-7.651,-0.2) 107(-7.651,-0.6) 108(-7.651,-1) 109(-7.651,-1.4) 110(-7.651,-1.8) 111(-7.651,-2.2) 112(-7.651,-2.6) 113(-7.651,-3) 114(-7.651,-3.4) 115(-7.651,-3.8) 116(-7.651,-4.2) 117(-7.651,-4.6) 118(-7.651,-5) 119(-7.651,-5.4) 120(-7.651,-5.8)
Top Overlay:
  circle w0.508: c-6.604,-8.128 r0.127
  lines w0.254: -6.096,-6.096 -6.096,6.096 6.096,6.096 6.096,-6.096 -6.096,-6.096
Mechanical 13:
  lines w0.1: -7,-7 -7,7 7,7 7,-7 -7,-7
3D body "LQFP120-14x14.STEP": height 1.45, standoff 0, extent -8.001,-8.003 8.005,8.003

## LQFP128 14x14_L [mm] "128脚，体宽：14x14mm, 脚距：0.4mm"
pads (128):
  oval 0.2x1.4 smd: 1(-6.2,-7.549) 2(-5.8,-7.549) 3(-5.4,-7.549) 4(-5,-7.549) 5(-4.6,-7.549) 6(-4.2,-7.549) 7(-3.8,-7.549) 8(-3.4,-7.549) 9(-3,-7.549) 10(-2.6,-7.549) 11(-2.2,-7.549) 12(-1.8,-7.549) 13(-1.4,-7.549) 14(-1,-7.549) 15(-0.6,-7.549) 16(-0.2,-7.549) 17(0.2,-7.549) 18(0.6,-7.549) 19(1,-7.549) 20(1.4,-7.549) 21(1.8,-7.549) 22(2.2,-7.549) 23(2.6,-7.549) 24(3,-7.549) 25(3.4,-7.549) 26(3.8,-7.549) 27(4.2,-7.549) 28(4.6,-7.549) 29(5,-7.549) 30(5.4,-7.549) 31(5.8,-7.549) 32(6.2,-7.549) 65(6.2,7.549) 66(5.8,7.549) 67(5.4,7.549) 68(5,7.549) 69(4.6,7.549) 70(4.2,7.549) 71(3.8,7.549) 72(3.4,7.549) 73(3,7.549) 74(2.6,7.549) 75(2.2,7.549) 76(1.8,7.549) 77(1.4,7.549) 78(1,7.549) 79(0.6,7.549) 80(0.2,7.549) 81(-0.2,7.549) 82(-0.6,7.549) 83(-1,7.549) 84(-1.4,7.549) 85(-1.8,7.549) 86(-2.2,7.549) 87(-2.6,7.549) 88(-3,7.549) 89(-3.4,7.549) 90(-3.8,7.549) 91(-4.2,7.549) 92(-4.6,7.549) 93(-5,7.549) 94(-5.4,7.549) 95(-5.8,7.549) 96(-6.2,7.549)
  oval 1.4x0.2 smd: 33(7.549,-6.2) 34(7.549,-5.8) 35(7.549,-5.4) 36(7.549,-5) 37(7.549,-4.6) 38(7.549,-4.2) 39(7.549,-3.8) 40(7.549,-3.4) 41(7.549,-3) 42(7.549,-2.6) 43(7.549,-2.2) 44(7.549,-1.8) 45(7.549,-1.4) 46(7.549,-1) 47(7.549,-0.6) 48(7.549,-0.2) 49(7.549,0.2) 50(7.549,0.6) 51(7.549,1) 52(7.549,1.4) 53(7.549,1.8) 54(7.549,2.2) 55(7.549,2.6) 56(7.549,3) 57(7.549,3.4) 58(7.549,3.8) 59(7.549,4.2) 60(7.549,4.6) 61(7.549,5) 62(7.549,5.4) 63(7.549,5.8) 64(7.549,6.2) 97(-7.549,6.2) 98(-7.549,5.8) 99(-7.549,5.4) 100(-7.549,5) 101(-7.549,4.6) 102(-7.549,4.2) 103(-7.549,3.8) 104(-7.549,3.4) 105(-7.549,3) 106(-7.549,2.6) 107(-7.549,2.2) 108(-7.549,1.8) 109(-7.549,1.4) 110(-7.549,1) 111(-7.549,0.6) 112(-7.549,0.2) 113(-7.549,-0.2) 114(-7.549,-0.6) 115(-7.549,-1) 116(-7.549,-1.4) 117(-7.549,-1.8) 118(-7.549,-2.2) 119(-7.549,-2.6) 120(-7.549,-3) 121(-7.549,-3.4) 122(-7.549,-3.8) 123(-7.549,-4.2) 124(-7.549,-4.6) 125(-7.549,-5) 126(-7.549,-5.4) 127(-7.549,-5.8) 128(-7.549,-6.2)
Top Overlay:
  circle w0.508: c-6.985,-7.874 r0.127
  circle w0.254: c-4.826,-4.826 r0.568
  lines w0.254: -6.096,-6.096 6.096,-6.096 6.096,6.096 -6.096,6.096 -6.096,-6.096
Mechanical 13:
  circle w0.1: c-6.1,-6.1 r0.5
  lines w0.1: -7,-7 -7,7 7,7 7,-7 -7,-7
Mechanical 15:
  circle w0.05: c0,0 r0.35
  lines w0.05: -0.5,0 0.5,0 ; 0,-0.5 0,0.5
  lines w0.1: -8.509,-8.509 8.509,-8.509 8.509,8.509 -8.509,8.509 -8.509,-8.509
3D body "LQFP128-14x14.STEP": height 1.45, standoff -0.01, extent -8.003,-8.003 8.003,8.003

## LQFP128 14x14_M [mm] "128脚，体宽：14x14mm, 脚距：0.4mm"
pads (128):
  oval 0.26x1.8 smd: 1(-6.2,-7.854) 2(-5.8,-7.854) 3(-5.4,-7.854) 4(-5,-7.854) 5(-4.6,-7.854) 6(-4.2,-7.854) 7(-3.8,-7.854) 8(-3.4,-7.854) 9(-3,-7.854) 10(-2.6,-7.854) 11(-2.2,-7.854) 12(-1.8,-7.854) 13(-1.4,-7.854) 14(-1,-7.854) 15(-0.6,-7.854) 16(-0.2,-7.854) 17(0.2,-7.854) 18(0.6,-7.854) 19(1,-7.854) 20(1.4,-7.854) 21(1.8,-7.854) 22(2.2,-7.854) 23(2.6,-7.854) 24(3,-7.854) 25(3.4,-7.854) 26(3.8,-7.854) 27(4.2,-7.854) 28(4.6,-7.854) 29(5,-7.854) 30(5.4,-7.854) 31(5.8,-7.854) 32(6.2,-7.854) 65(6.2,7.854) 66(5.8,7.854) 67(5.4,7.854) 68(5,7.854) 69(4.6,7.854) 70(4.2,7.854) 71(3.8,7.854) 72(3.4,7.854) 73(3,7.854) 74(2.6,7.854) 75(2.2,7.854) 76(1.8,7.854) 77(1.4,7.854) 78(1,7.854) 79(0.6,7.854) 80(0.2,7.854) 81(-0.2,7.854) 82(-0.6,7.854) 83(-1,7.854) 84(-1.4,7.854) 85(-1.8,7.854) 86(-2.2,7.854) 87(-2.6,7.854) 88(-3,7.854) 89(-3.4,7.854) 90(-3.8,7.854) 91(-4.2,7.854) 92(-4.6,7.854) 93(-5,7.854) 94(-5.4,7.854) 95(-5.8,7.854) 96(-6.2,7.854)
  oval 1.8x0.26 smd: 33(7.854,-6.2) 34(7.854,-5.8) 35(7.854,-5.4) 36(7.854,-5) 37(7.854,-4.6) 38(7.854,-4.2) 39(7.854,-3.8) 40(7.854,-3.4) 41(7.854,-3) 42(7.854,-2.6) 43(7.854,-2.2) 44(7.854,-1.8) 45(7.854,-1.4) 46(7.854,-1) 47(7.854,-0.6) 48(7.854,-0.2) 49(7.854,0.2) 50(7.854,0.6) 51(7.854,1) 52(7.854,1.4) 53(7.854,1.8) 54(7.854,2.2) 55(7.854,2.6) 56(7.854,3) 57(7.854,3.4) 58(7.854,3.8) 59(7.854,4.2) 60(7.854,4.6) 61(7.854,5) 62(7.854,5.4) 63(7.854,5.8) 64(7.854,6.2) 97(-7.854,6.2) 98(-7.854,5.8) 99(-7.854,5.4) 100(-7.854,5) 101(-7.854,4.6) 102(-7.854,4.2) 103(-7.854,3.8) 104(-7.854,3.4) 105(-7.854,3) 106(-7.854,2.6) 107(-7.854,2.2) 108(-7.854,1.8) 109(-7.854,1.4) 110(-7.854,1) 111(-7.854,0.6) 112(-7.854,0.2) 113(-7.854,-0.2) 114(-7.854,-0.6) 115(-7.854,-1) 116(-7.854,-1.4) 117(-7.854,-1.8) 118(-7.854,-2.2) 119(-7.854,-2.6) 120(-7.854,-3) 121(-7.854,-3.4) 122(-7.854,-3.8) 123(-7.854,-4.2) 124(-7.854,-4.6) 125(-7.854,-5) 126(-7.854,-5.4) 127(-7.854,-5.8) 128(-7.854,-6.2)
Top Overlay:
  circle w0.508: c-6.985,-8.382 r0.127
  circle w0.254: c-4.826,-4.826 r0.568
  lines w0.254: -6.096,-6.096 6.096,-6.096 6.096,6.096 -6.096,6.096 -6.096,-6.096
Mechanical 13:
  circle w0.1: c-6.1,-6.1 r0.5
  lines w0.1: -7,-7 -7,7 7,7 7,-7 -7,-7
Mechanical 15:
  circle w0.05: c0,0 r0.35
  lines w0.05: -0.5,0 0.5,0 ; 0,-0.5 0,0.5
  lines w0.1: -9.017,-9.017 9.017,-9.017 9.017,9.017 -9.017,9.017 -9.017,-9.017
3D body "LQFP128-14x14.STEP": height 1.45, standoff -0.01, extent -8.003,-8.003 8.003,8.003

## LQFP128 14x14_N [mm] "128脚，体宽：14x14mm, 脚距：0.4mm"
pads (128):
  oval 0.23x1.6 smd: 1(-6.2,-7.648) 2(-5.8,-7.648) 3(-5.4,-7.648) 4(-5,-7.648) 5(-4.6,-7.648) 6(-4.2,-7.648) 7(-3.8,-7.648) 8(-3.4,-7.648) 9(-3,-7.648) 10(-2.6,-7.648) 11(-2.2,-7.648) 12(-1.8,-7.648) 13(-1.4,-7.648) 14(-1,-7.648) 15(-0.6,-7.648) 16(-0.2,-7.648) 17(0.2,-7.648) 18(0.6,-7.648) 19(1,-7.648) 20(1.4,-7.648) 21(1.8,-7.648) 22(2.2,-7.648) 23(2.6,-7.648) 24(3,-7.648) 25(3.4,-7.648) 26(3.8,-7.648) 27(4.2,-7.648) 28(4.6,-7.648) 29(5,-7.648) 30(5.4,-7.648) 31(5.8,-7.648) 32(6.2,-7.648) 65(6.2,7.653) 66(5.8,7.653) 67(5.4,7.653) 68(5,7.653) 69(4.6,7.653) 70(4.2,7.653) 71(3.8,7.653) 72(3.4,7.653) 73(3,7.653) 74(2.6,7.653) 75(2.2,7.653) 76(1.8,7.653) 77(1.4,7.653) 78(1,7.653) 79(0.6,7.653) 80(0.2,7.653) 81(-0.2,7.653) 82(-0.6,7.653) 83(-1,7.653) 84(-1.4,7.653) 85(-1.8,7.653) 86(-2.2,7.653) 87(-2.6,7.653) 88(-3,7.653) 89(-3.4,7.653) 90(-3.8,7.653) 91(-4.2,7.653) 92(-4.6,7.653) 93(-5,7.653) 94(-5.4,7.653) 95(-5.8,7.653) 96(-6.2,7.653)
  oval 1.6x0.23 smd: 33(7.651,-6.198) 34(7.651,-5.798) 35(7.651,-5.398) 36(7.651,-4.998) 37(7.651,-4.598) 38(7.651,-4.198) 39(7.651,-3.798) 40(7.651,-3.398) 41(7.651,-2.998) 42(7.651,-2.598) 43(7.651,-2.198) 44(7.651,-1.798) 45(7.651,-1.398) 46(7.651,-0.998) 47(7.651,-0.598) 48(7.651,-0.198) 49(7.651,0.202) 50(7.651,0.602) 51(7.651,1.002) 52(7.651,1.402) 53(7.651,1.802) 54(7.651,2.202) 55(7.651,2.602) 56(7.651,3.002) 57(7.651,3.402) 58(7.651,3.802) 59(7.651,4.202) 60(7.651,4.602) 61(7.651,5.002) 62(7.651,5.402) 63(7.651,5.802) 64(7.651,6.202) 97(-7.651,6.202) 98(-7.651,5.802) 99(-7.651,5.402) 100(-7.651,5.002) 101(-7.651,4.602) 102(-7.651,4.202) 103(-7.651,3.802) 104(-7.651,3.402) 105(-7.651,3.002) 106(-7.651,2.602) 107(-7.651,2.202) 108(-7.651,1.802) 109(-7.651,1.402) 110(-7.651,1.002) 111(-7.651,0.602) 112(-7.651,0.202) 113(-7.651,-0.198) 114(-7.651,-0.598) 115(-7.651,-0.998) 116(-7.651,-1.398) 117(-7.651,-1.798) 118(-7.651,-2.198) 119(-7.651,-2.598) 120(-7.651,-2.998) 121(-7.651,-3.398) 122(-7.651,-3.798) 123(-7.651,-4.198) 124(-7.651,-4.598) 125(-7.651,-4.998) 126(-7.651,-5.398) 127(-7.651,-5.798) 128(-7.651,-6.198)
Top Overlay:
  circle w0.254: c-4.826,-4.824 r0.568
  circle w0.508: c-6.985,-8.001 r0.127
  lines w0.254: -6.096,-6.094 -6.096,6.098 6.096,6.098 6.096,-6.094 -6.096,-6.094
Mechanical 13:
  circle w0.1: c-6.1,-6.098 r0.5
  lines w0.1: -7,-6.998 7,-6.998 7,7.002 -7,7.002 -7,-6.998
Mechanical 15:
  circle w0.05: c0,0.002 r0.35
  lines w0.05: -0.5,0.002 0.5,0.002 ; 0,-0.498 0,0.502
  lines w0.1: -8.636,-8.636 -8.636,8.636 8.636,8.636 8.636,-8.636 -8.636,-8.636
3D body "LQFP128-14x14.STEP": height 1.45, standoff -0.01, extent -8.003,-8 8.003,8.005

## LQFP128 14x20_L [mm] "128脚，体宽：14x20mm, 脚距：0.5mm"
pads (128):
  oval 0.25x1.5 smd: 1(-9,-7.517) 2(-8.5,-7.517) 3(-8,-7.517) 4(-7.5,-7.517) 5(-7,-7.517) 6(-6.5,-7.517) 7(-6,-7.517) 8(-5.5,-7.517) 9(-5,-7.517) 10(-4.5,-7.517) 11(-4,-7.517) 12(-3.5,-7.517) 13(-3,-7.517) 14(-2.5,-7.517) 15(-2,-7.517) 16(-1.5,-7.517) 17(-1,-7.517) 18(-0.5,-7.517) 19(0,-7.517) 20(0.5,-7.517) 21(1,-7.517) 22(1.5,-7.517) 23(2,-7.517) 24(2.5,-7.517) 25(3,-7.517) 26(3.5,-7.517) 27(4,-7.517) 28(4.5,-7.517) 29(5,-7.517) 30(5.5,-7.517) 31(6,-7.517) 32(6.5,-7.517) 33(7,-7.517) 34(7.5,-7.517) 35(8,-7.517) 36(8.5,-7.517) 37(9,-7.517) 65(9,7.517) 66(8.5,7.517) 67(8,7.517) 68(7.5,7.517) 69(7,7.517) 70(6.5,7.517) 71(6,7.517) 72(5.5,7.517) 73(5,7.517) 74(4.5,7.517) 75(4,7.517) 76(3.5,7.517) 77(3,7.517) 78(2.5,7.517) 79(2,7.517) 80(1.5,7.517) 81(1,7.517) 82(0.5,7.517) 83(0,7.517) 84(-0.5,7.517) 85(-1,7.517) 86(-1.5,7.517) 87(-2,7.517) 88(-2.5,7.517) 89(-3,7.517) 90(-3.5,7.517) 91(-4,7.517) 92(-4.5,7.517) 93(-5,7.517) 94(-5.5,7.517) 95(-6,7.517) 96(-6.5,7.517) 97(-7,7.517) 98(-7.5,7.517) 99(-8,7.517) 100(-8.5,7.517) 101(-9,7.517)
  oval 1.5x0.25 smd: 38(10.517,-6.5) 39(10.517,-6) 40(10.517,-5.5) 41(10.517,-5) 42(10.517,-4.5) 43(10.517,-4) 44(10.517,-3.5) 45(10.517,-3) 46(10.517,-2.5) 47(10.517,-2) 48(10.517,-1.5) 49(10.517,-1) 50(10.517,-0.5) 51(10.517,0) 52(10.517,0.5) 53(10.517,1) 54(10.517,1.5) 55(10.517,2) 56(10.517,2.5) 57(10.517,3) 58(10.517,3.5) 59(10.517,4) 60(10.517,4.5) 61(10.517,5) 62(10.517,5.5) 63(10.517,6) 64(10.517,6.5) 102(-10.517,6.5) 103(-10.517,6) 104(-10.517,5.5) 105(-10.517,5) 106(-10.517,4.5) 107(-10.517,4) 108(-10.517,3.5) 109(-10.517,3) 110(-10.517,2.5) 111(-10.517,2) 112(-10.517,1.5) 113(-10.517,1) 114(-10.517,0.5) 115(-10.517,0) 116(-10.517,-0.5) 117(-10.517,-1) 118(-10.517,-1.5) 119(-10.517,-2) 120(-10.517,-2.5) 121(-10.517,-3) 122(-10.517,-3.5) 123(-10.517,-4) 124(-10.517,-4.5) 125(-10.517,-5) 126(-10.517,-5.5) 127(-10.517,-6) 128(-10.517,-6.5)
Top Overlay:
  circle w0.254: c-7.62,-4.572 r0.762
  circle w0.508: c-10.033,-7.874 r0.25
  lines w0.254: -9.144,-6.096 9.144,-6.096 9.144,6.096 -9.144,6.096 -9.144,-6.096
Mechanical 13:
  circle w0.1: c-8.476,-5.476 r0.762
  lines w0.1: -10,-7 -10,7 10,7 10,-7 -10,-7
Mechanical 15:
  circle w0.05: c0,0 r0.35
  lines w0.05: -0.5,0 0.5,0 ; 0,-0.5 0,0.5
  lines w0.1: -11.684,-8.636 11.684,-8.636 11.684,8.636 -11.684,8.636 -11.684,-8.636
3D body "LQFP128-14x20.STEP": height 1.45, standoff -0.01, extent -11.003,-8.003 11.003,8.003

## LQFP128 14x20_M [mm] "128脚，体宽：14x20mm, 脚距：0.5mm"
pads (128):
  oval 0.35x2.1 smd: 1(-9,-7.746) 2(-8.5,-7.746) 3(-8,-7.746) 4(-7.5,-7.746) 5(-7,-7.746) 6(-6.5,-7.746) 7(-6,-7.746) 8(-5.5,-7.746) 9(-5,-7.746) 10(-4.5,-7.746) 11(-4,-7.746) 12(-3.5,-7.746) 13(-3,-7.746) 14(-2.5,-7.746) 15(-2,-7.746) 16(-1.5,-7.746) 17(-1,-7.746) 18(-0.5,-7.746) 19(0,-7.746) 20(0.5,-7.746) 21(1,-7.746) 22(1.5,-7.746) 23(2,-7.746) 24(2.5,-7.746) 25(3,-7.746) 26(3.5,-7.746) 27(4,-7.746) 28(4.5,-7.746) 29(5,-7.746) 30(5.5,-7.746) 31(6,-7.746) 32(6.5,-7.746) 33(7,-7.746) 34(7.5,-7.746) 35(8,-7.746) 36(8.5,-7.746) 37(9,-7.746) 65(9.025,7.746) 66(8.5,7.746) 67(8,7.746) 68(7.5,7.746) 69(7,7.746) 70(6.5,7.746) 71(6,7.746) 72(5.5,7.746) 73(5,7.746) 74(4.5,7.746) 75(4,7.746) 76(3.5,7.746) 77(3,7.746) 78(2.5,7.746) 79(2,7.746) 80(1.5,7.746) 81(1,7.746) 82(0.5,7.746) 83(0,7.746) 84(-0.5,7.746) 85(-1,7.746) 86(-1.5,7.746) 87(-2,7.746) 88(-2.5,7.746) 89(-3,7.746) 90(-3.5,7.746) 91(-4,7.746) 92(-4.5,7.746) 93(-5,7.746) 94(-5.5,7.746) 95(-6,7.746) 96(-6.5,7.746) 97(-7,7.746) 98(-7.5,7.746) 99(-8,7.746) 100(-8.5,7.746) 101(-9,7.746)
  oval 2.1x0.35 smd: 38(10.746,-6.5) 39(10.746,-6) 40(10.746,-5.5) 41(10.746,-5) 42(10.746,-4.5) 43(10.746,-4) 44(10.746,-3.5) 45(10.746,-3) 46(10.746,-2.5) 47(10.746,-2) 48(10.746,-1.5) 49(10.746,-1) 50(10.746,-0.5) 51(10.746,0) 52(10.746,0.5) 53(10.746,1) 54(10.746,1.5) 55(10.746,2) 56(10.746,2.5) 57(10.746,3) 58(10.746,3.5) 59(10.746,4) 60(10.746,4.5) 61(10.746,5) 62(10.746,5.5) 63(10.746,6) 64(10.746,6.5) 102(-10.746,6.5) 103(-10.746,6) 104(-10.746,5.5) 105(-10.746,5) 106(-10.746,4.5) 107(-10.746,4) 108(-10.746,3.5) 109(-10.746,3) 110(-10.746,2.5) 111(-10.746,2) 112(-10.746,1.5) 113(-10.746,1) 114(-10.746,0.5) 115(-10.746,0) 116(-10.746,-0.5) 117(-10.746,-1) 118(-10.746,-1.5) 119(-10.746,-2) 120(-10.746,-2.5) 121(-10.746,-3) 122(-10.746,-3.5) 123(-10.746,-4) 124(-10.746,-4.5) 125(-10.746,-5) 126(-10.746,-5.5) 127(-10.746,-6) 128(-10.746,-6.5)
Top Overlay:
  circle w0.508: c-10.033,-8.255 r0.25
  circle w0.254: c-7.62,-4.572 r0.762
  lines w0.254: -9.144,-6.096 9.144,-6.096 9.144,6.096 -9.144,6.096 -9.144,-6.096
Mechanical 13:
  circle w0.1: c-8.476,-5.476 r0.762
  lines w0.1: -10,-7 -10,7 10,7 10,-7 -10,-7
Mechanical 15:
  circle w0.05: c0,0 r0.35
  lines w0.05: -0.5,0 0.5,0 ; 0,-0.5 0,0.5
  lines w0.1: -12.065,-9.017 12.065,-9.017 12.065,9.017 -12.065,9.017 -12.065,-9.017
3D body "LQFP128-14x20.STEP": height 1.45, standoff -0.01, extent -11.003,-8.003 11.003,8.003